# EAGLE library part EMIF06-HSD03F3 (library EMIF06-HSD03F3)
RLC EMI Filter 3rd Order Low Pass 6 Channel L = 1nH, C = 2.5pF 17-WFBGA, FCBGA Source: Datasheet <https://www.st.com/resource/en/datasheet/emif06-hsd03f3.pdf>
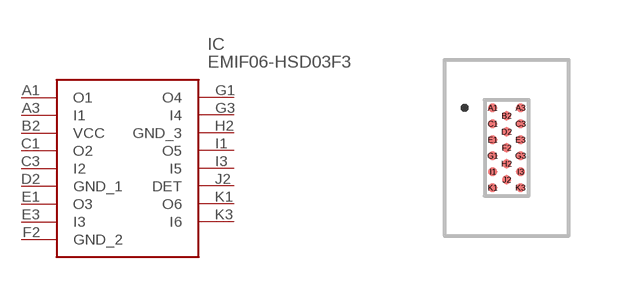
[diagram p0: symbol with the pads of EMIF06HSD03F3; footprint EMIF06HSD03F3]

Designator prefix IC

## EMIF06-HSD03F3 (Description: RLC EMI Filter 3rd Order Low Pass 6 Channel L = 1nH, C = 2.5pF 17-WFBGA, FCBGA; Height: 0.65mm; Manufacturer_Name: STMicroelectronics; Manufacturer_Part_Number: EMIF06-HSD03F3; Mouser_Part_Number: 511-EMIF06-HSD03F3; Mouser_Price-Stock: https://www.mouser.co.uk/ProductDetail/STMicroelectronics/EMIF06-HSD03F3?qs=wkiPY8TIIKeA9WXM%252BftrUw%3D%3D)  [EMIF06HSD03F3]
A1  O1
A3  I1
B2  VCC
C1  O2
C3  I2
D2  GND_1
E1  O3
E3  I3
F2  GND_2
G1  O4
G3  I4
H2  GND_3
I1  O5
I3  I5
J2  DET
K1  O6
K3  I6

## Footprint EMIF06HSD03F3 (pad centres in mm)
EMIF06-HSD03F3-10
smd 0.22 x 0.22: A1 -0.346,1; A3 0.346,1; B2 0,0.8; C1 -0.346,0.6; C3 0.346,0.6; D2 0,0.4; E1 -0.346,0.2; E3 0.346,0.2; F2 0,0; G1 -0.346,-0.2; G3 0.346,-0.2; H2 0,-0.4; I1 -0.346,-0.6; I3 0.346,-0.6; J2 0,-0.8; K1 -0.346,-1; K3 0.346,-1